# Altium schematic symbol library IHLP2020CZER4R7M01.SchLib: 1 symbol
Pins are listed as number, name and electrical type; pins without a type are passive.

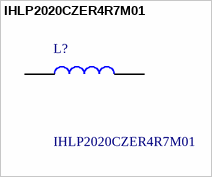
[diagram p0: symbol IHLP2020CZER4R7M01]

## IHLP2020CZER4R7M01
designator L?
Vishay IHLP2020CZ-01 Series Shielded Wire-wound SMD Inductor 4.7 uH +/-20% 8.2A Idc; Geometry.Height: 3mm; Mouser Part Number: 70-IHLP2020CZER4R7M0; Mouser Price/Stock: https://www.mouser.co.uk/ProductDetail/Vishay-Dale/IHLP2020CZER4R7M01?qs=GxOUx7aO6nycfkr%252BvLVVZQ%3D%3D; Manufacturer_Name: Vishay; Manufacturer_Part_Number: IHLP2020CZER4R7M01; Datasheet Link: https://www.vishay.com/docs/34563/ihlp-2020cz-8a.pdf
footprint INDPM5552X300N
pins: 1, 2